# Altium schematic symbol library ISO485_Parts.SchLib: 9 symbols
Pins are listed as number, name and electrical type; pins without a type are passive.

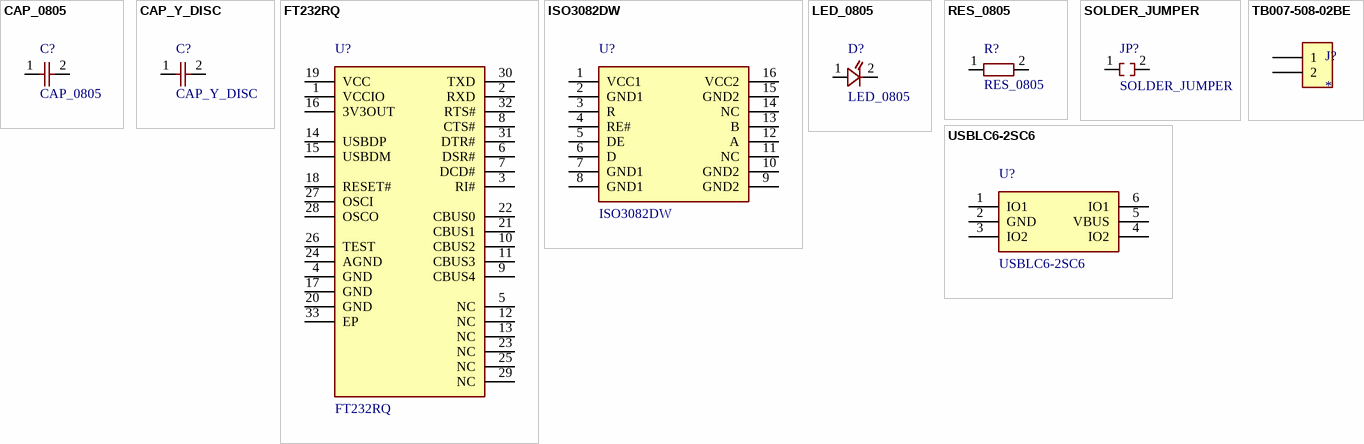
[diagram p0: symbols CAP_0805 to USBLC6-2SC6]

## CAP_0805
designator C?
Ceramic capacitor 0805 (set value in Comment)
footprint C0805_GEN (Footprint)
pins: 1, 2

## CAP_Y_DISC
designator C?
Safety Y1/Y2 ceramic disc capacitor, 7.5mm pitch (blue)
footprint CAP_DISC_7P5 (Footprint)
pins: 1, 2

## FT232RQ
designator U?
USB to UART bridge, QFN-32 (FTDI)
footprint QFN32_5X5 (Footprint)
pins: 1 VCCIO, 2 RXD, 3 RI#, 4 GND, 5 NC, 6 DSR#, 7 DCD#, 8 CTS#, 9 CBUS4, 10 CBUS2, 11 CBUS3, 12 NC, 13 NC, 14 USBDP, 15 USBDM, 16 3V3OUT, 17 GND, 18 RESET#, 19 VCC, 20 GND, 21 CBUS1, 22 CBUS0, 23 NC, 24 AGND, 25 NC, 26 TEST, 27 OSCI, 28 OSCO, 29 NC, 30 TXD, 31 DTR#, 32 RTS#, 33 EP

## ISO3082DW
designator U?
Isolated RS-485 transceiver, half duplex, 5V, SOIC-16W (TI)
footprint SOIC16W (Footprint)
pins: 1 VCC1, 2 GND1, 3 R, 4 RE#, 5 DE, 6 D, 7 GND1, 8 GND1, 9 GND2, 10 GND2, 11 NC, 12 A, 13 B, 14 NC, 15 GND2, 16 VCC2

## LED_0805
designator D?
LED 0805, pin1 = Anode, pin2 = Cathode
footprint LED0805_GEN (Footprint)
pins: 1 A, 2 K

## RES_0805
designator R?
Chip resistor 0805 (set value in Comment)
footprint R0805_GEN (Footprint)
pins: 1, 2

## SOLDER_JUMPER
designator JP?
Solder jumper, normally open
footprint SJ_2PAD (Footprint)
pins: 1, 2

## TB007-508-02BE
designator J?
2~24 Poles, Screw Type, Horizontal, 5.08 Pitch, 24~12 (AWG), Terminal Block Connector; MF: Same Sky; MP: TB007-508-02BE; SnapEDA_Link: https://www.snapeda.com/parts/TB007-508-02BE/Same+Sky/view-part/?ref=snap; Package: None; Value: *; Check_prices: https://www.snapeda.com/parts/TB007-508-02BE/Same+Sky/view-part/?ref=eda
footprint CUI_TB007-508-02BE
pins: 1, 2

## USBLC6-2SC6
designator U?
USB ESD protection, SOT-23-6 (ST)
footprint SOT23_6 (Footprint)
pins: 1 IO1, 2 GND, 3 IO2, 4 IO2, 5 VBUS, 6 IO1